# Altium footprint library EEE-FK0J221P.PcbLib: 3 footprints
Each footprint in its own frame and in the unit in brackets; x right, y up, seen from the top. Pads: shape width x height; smd on the part's side, far side on the other; paste and mask are expansions set on the pad; w line width, h text height; cw(c..) or ccw(c..) is an arc to the next point about the centre after c.
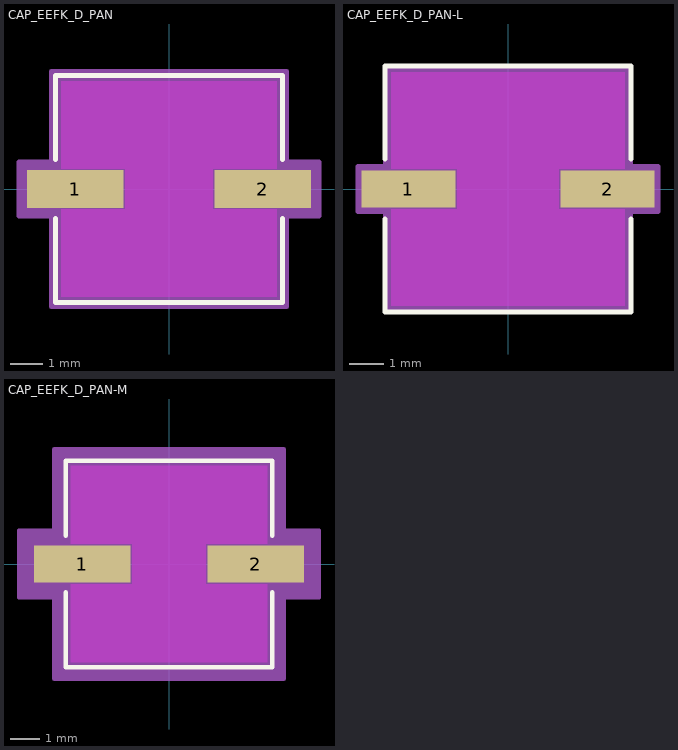
[diagram p0: the footprints below, top view; thin cyan lines are the x and y axes]

## CAP_EEFK_D_PAN [mil]
pads (2):
  rect 118x46 smd paste+0 mask+0: 1(-114.5,0) 2(114.5,0)
Top Layer keep-out:
  region: -132,-132 -132,-25 132,-25 132,-132
  region: -132,25 -132,132 132,132 132,25
  region: -53.5,-25 -53.5,25 53.5,25 53.5,-25
Top Overlay:
  lines w6: -139,-36.1 -139,-139 139,-139 139,-36.1 ; -139,36.1 -139,139 139,139 139,36.1
Keep-Out Layer:
  region: -53.5,-25 -53.5,25 53.5,25 53.5,-25
Mechanical 13:
  lines w1: -134,-67 -67,-134 ; -134,67 -67,134 ; -134,-134 -134,134 134,134 134,-134 -134,-134
Mechanical 15:
  region: -144,-33 -183.5,-33 -183.5,33 -144,33 -144,144 144,144 144,33 183.5,33 183.5,-33 144,-33 144,-144 -144,-144
  lines w6: -183.5,-33 -144,-33 -144,-144 144,-144 144,-33 183.5,-33 183.5,33 144,33 144,144 -144,144 -144,33 -183.5,33 -183.5,-33
3D body "CAP_EEFK_D_PAN.step": height 242.09, standoff 0, extent -153.5,-134.02 153.5,134.02

## CAP_EEFK_D_PAN-L [mil]
pads (2):
  rect 106x42 smd paste+0 mask+0: 1(-112.5,0) 2(112.5,0)
Top Layer keep-out:
  region: -57.5,-23 -57.5,23 57.5,23 57.5,-23
  region: -132,23 -132,132 132,132 132,23
  region: -132,-132 -132,-23 132,-23 132,-132
Top Overlay:
  lines w6: -139,-34.1 -139,-139 139,-139 139,-34.1 ; -139,34.1 -139,139 139,139 139,34.1
  text ".Designator" at -137.5,-25 h50
Keep-Out Layer:
  region: -57.5,-23 -57.5,23 57.5,23 57.5,-23
Mechanical 13:
  lines w1: -134,-67 -67,-134 ; -134,67 -67,134 ; -134,-134 134,-134 134,134 -134,134 -134,-134
  text ".Designator" at -137.5,-25 h50
Mechanical 15:
  region: -138,-25 -169.5,-25 -169.5,25 -138,25 -138,138 138,138 138,25 169.5,25 169.5,-25 138,-25 138,-138 -138,-138
  lines w6: -169.5,-25 -169.5,25 -138,25 -138,138 138,138 138,25 169.5,25 169.5,-25 138,-25 138,-138 -138,-138 -138,-25 -169.5,-25
3D body "CAP_EEFK_D_PAN.step": height 242.09, standoff 0, extent -153.5,-134.02 153.5,134.02

## CAP_EEFK_D_PAN-M [mil]
pads (2):
  rect 130x50 smd paste+0 mask+0: 1(-116.5,0) 2(116.5,0)
Top Layer keep-out:
  region: -49.5,-27 -49.5,27 49.5,27 49.5,-27
  region: -132,27 -132,132 132,132 132,27
  region: -132,-132 -132,-27 132,-27 132,-132
Top Overlay:
  lines w6: -139,-38.1 -139,-139 139,-139 139,-38.1 ; -139,38.1 -139,139 139,139 139,38.1
  text ".Designator" at -137.5,-25 h50
Keep-Out Layer:
  region: -49.5,-27 -49.5,27 49.5,27 49.5,-27
Mechanical 13:
  lines w1: -134,-67 -67,-134 ; -134,67 -67,134 ; -134,-134 134,-134 134,134 -134,134 -134,-134
  text ".Designator" at -137.5,-25 h50
Mechanical 15:
  region: -154,-45 -201.5,-45 -201.5,45 -154,45 -154,154 154,154 154,45 201.5,45 201.5,-45 154,-45 154,-154 -154,-154
  lines w6: -201.5,-45 -201.5,45 -154,45 -154,154 154,154 154,45 201.5,45 201.5,-45 154,-45 154,-154 -154,-154 -154,-45 -201.5,-45
3D body "CAP_EEFK_D_PAN.step": height 242.09, standoff 0, extent -153.5,-134.02 153.5,134.02